# Altium footprint library Package_DFN_QFN.PcbLib: 735 footprints (part 10 of 46)
Each footprint in its own frame and in the unit in brackets; x right, y up, seen from the top. Pads: shape width x height; smd on the part's side, far side on the other; paste and mask are expansions set on the pad; w line width, h text height; cw(c..) or ccw(c..) is an arc to the next point about the centre after c.
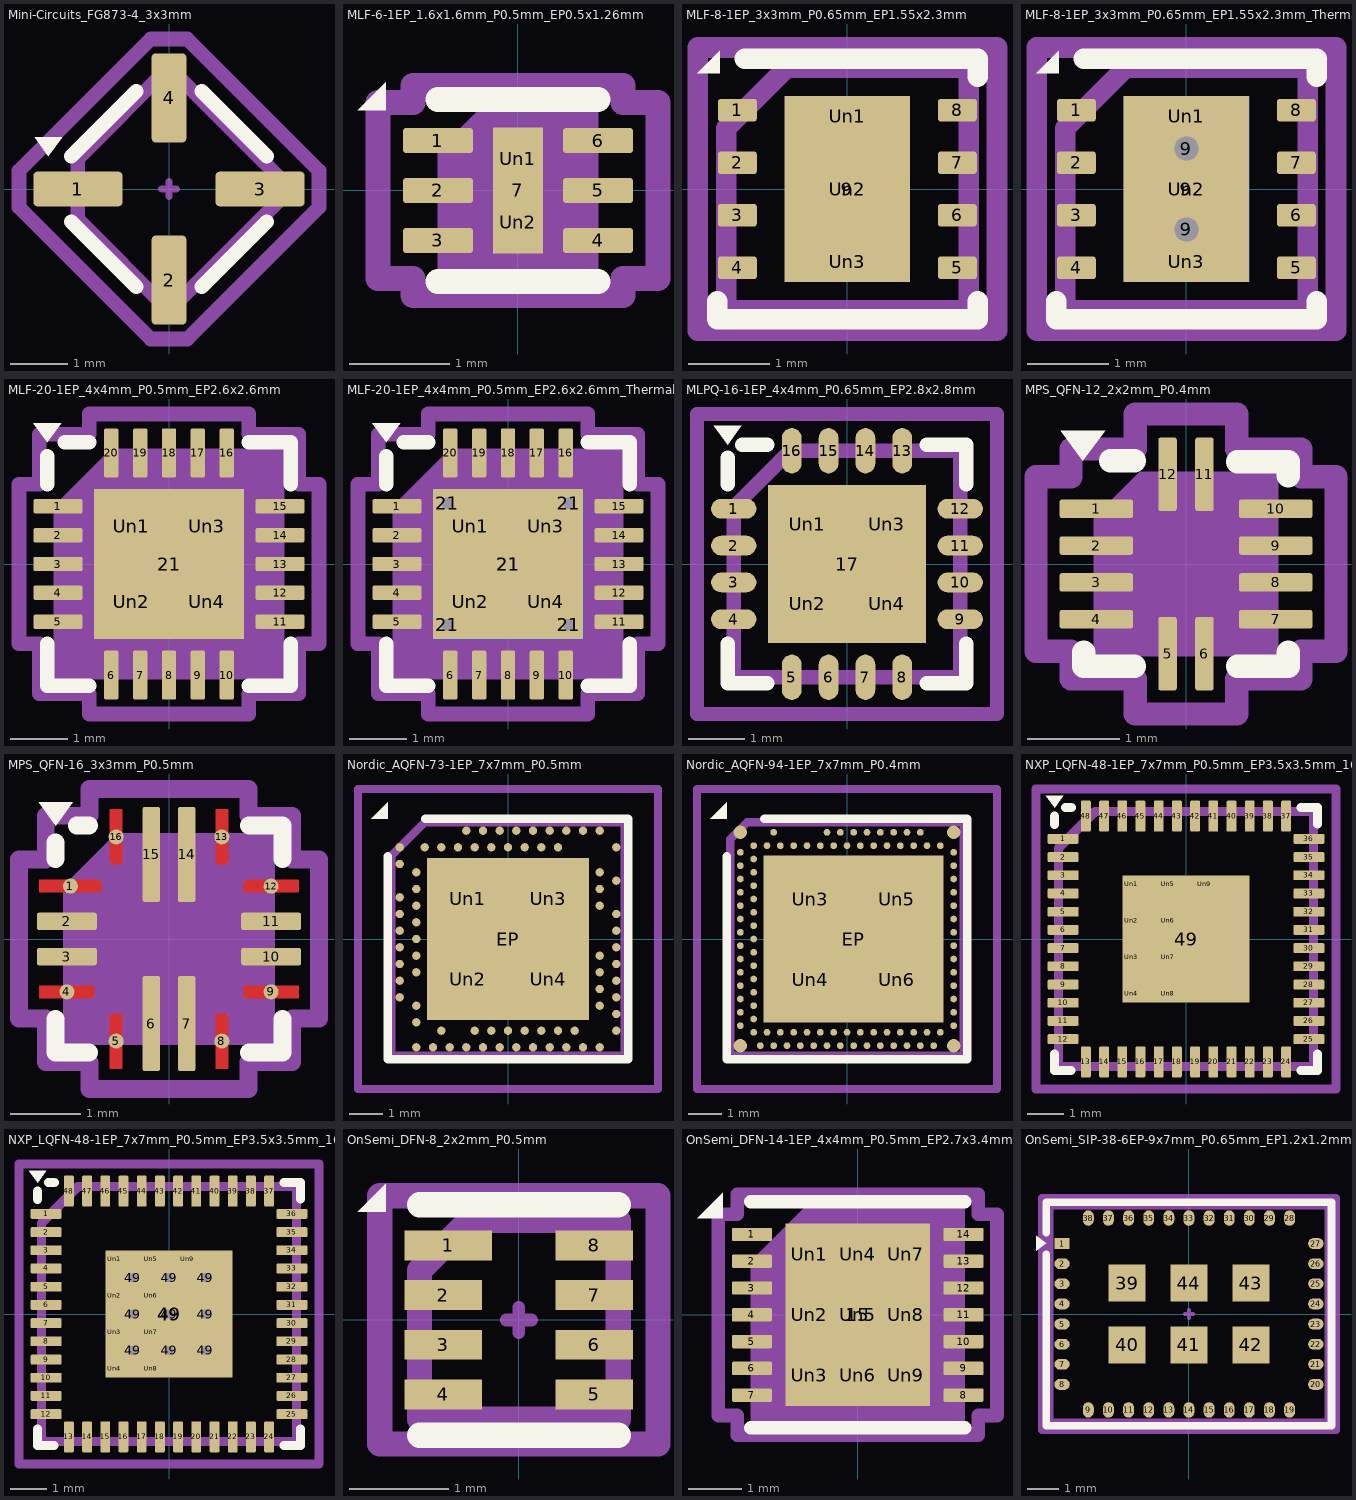
[diagram p9: the footprints below, top view; thin cyan lines are the x and y axes]

## Mini-Circuits_FG873-4_3x3mm [mm] "Mini-Circuits_FG873-4_3x3mm"
pads (4):
  rrect25% 1.55x0.61 smd: 1(-1.585,0) 3(1.585,0)
  rrect25% 0.61x1.55 smd: 2(0,-1.585) 4(0,1.585)
F.SilkS:
  region: -2.1,0.57 -2.34,0.9 -1.86,0.9
  lines w0.254: -1.7,-0.57 -0.57,-1.7 ; -1.7,0.57 -0.57,1.7 ; 0.57,-1.7 1.7,-0.57 ; 0.57,1.7 1.7,0.57
Top Component Center:
  lines w0.127: -0.127,0 0.127,0 -0.127,0 ; 0,-0.127 0,0.127 0,-0.127
Top Assembly:
  lines w0.254: -1.591,-0.53 -1.591,0.53 0,2.121 2.121,0 0,-2.121 -1.591,-0.53
Top Courtyard:
  lines w0.254: -2.61,-0.32 -2.61,0.32 -0.32,2.61 0.32,2.61 2.61,0.32 2.61,-0.32 0.32,-2.61 -0.32,-2.61 -2.61,-0.32
Top Designator:
  text ".Designator" at -3.43,-0.344 h1.52
3D body "Mini-Circuits_FG873-4_3x3mm.step": height 0.89, standoff 0, extent -2.11,-2.107 2.11,2.107

## MLF-6-1EP_1.6x1.6mm_P0.5mm_EP0.5x1.26mm [mm] "MLF-6-1EP_1.6x1.6mm_P0.5mm_EP0.5x1.26mm"
pads (9):
  rrect25% 0.7x0.25 smd: 1(-0.8,0.5) 2(-0.8,0) 3(-0.8,-0.5) 4(0.8,-0.5) 5(0.8,0) 6(0.8,0.5)
  rect 0.5x1.26 smd: 7(0,0)
  rrect25% 0.4x0.51 on Top Paste: Un1(0,0.315) Un2(0,-0.315)
F.SilkS:
  region: -1.32,0.8 -1.6,0.8 -1.32,1.08
  lines w0.254: -0.8,-0.91 0.8,-0.91 ; -0.8,0.91 0.8,0.91
Top Component Center:
  lines w0.127: -0.127,0 0.127,0 -0.127,0 ; 0,-0.127 0,0.127 0,-0.127
Top Assembly:
  region: 0.8,-0.8 -0.8,-0.8 -0.8,0.4 -0.4,0.8 0.8,0.8
Top Courtyard:
  lines w0.254: -1.4,-0.88 -1.05,-0.88 -1.05,-1.05 1.05,-1.05 1.05,-0.88 1.4,-0.88 1.4,0.88 1.05,0.88 1.05,1.05 -1.05,1.05 -1.05,0.88 -1.4,0.88 -1.4,-0.88
Top Designator:
  text ".Designator" at -2.251,-0.226 h1

## MLF-8-1EP_3x3mm_P0.65mm_EP1.55x2.3mm [mm] "MLF-8-1EP_3x3mm_P0.65mm_EP1.55x2.3mm"
pads (12):
  rrect25% 0.48x0.28 smd: 1(-1.36,0.975) 2(-1.36,0.325) 3(-1.36,-0.325) 4(-1.36,-0.975) 5(1.36,-0.975) 6(1.36,-0.325) 7(1.36,0.325) 8(1.36,0.975)
  rect 1.55x2.3 smd: 9(0,0)
  rrect25% 1.5x0.4 on Top Paste: Un1(0,0.9) Un3(0,-0.9)
  rrect25% 1.5x0.65 on Top Paste: Un2(0,0)
F.SilkS:
  region: -1.58,1.43 -1.86,1.43 -1.58,1.71
  lines w0.254: -1.61,-1.39 -1.61,-1.61 1.61,-1.61 1.61,-1.39 ; -1.27,1.61 1.61,1.61 1.61,1.39
Top Component Center:
  lines w0.127: -0.127,0 0.127,0 -0.127,0 ; 0,-0.127 0,0.127 0,-0.127
Top Assembly:
  lines w0.254: -1.5,-1.5 1.5,-1.5 1.5,1.5 -0.75,1.5 -1.5,0.75 -1.5,-1.5
Top Courtyard:
  lines w0.254: -1.85,-1.75 1.85,-1.75 1.85,1.75 -1.85,1.75 -1.85,-1.75
Top Designator:
  text ".Designator" at -2.251,-0.226 h1

## MLF-8-1EP_3x3mm_P0.65mm_EP1.55x2.3mm_ThermalVias [mm] "MLF-8-1EP_3x3mm_P0.65mm_EP1.55x2.3mm_ThermalVias"
pads (15):
  rrect25% 0.48x0.28 smd: 1(-1.36,0.975) 2(-1.36,0.325) 3(-1.36,-0.325) 4(-1.36,-0.975) 5(1.36,-0.975) 6(1.36,-0.325) 7(1.36,0.325) 8(1.36,0.975)
  round 0.6 hole 0.3: 9(0,-0.5) 9(0,0.5)
  rect 1.55x2.3 smd: 9(0,0)
  rect 1.55x2.3 smd far side: 9(0,0)
  rrect25% 1.5x0.4 on Top Paste: Un1(0,0.9) Un3(0,-0.9)
  rrect25% 1.5x0.65 on Top Paste: Un2(0,0)
F.SilkS:
  region: -1.58,1.43 -1.86,1.43 -1.58,1.71
  lines w0.254: -1.61,-1.39 -1.61,-1.61 1.61,-1.61 1.61,-1.39 ; -1.27,1.61 1.61,1.61 1.61,1.39
Top Component Center:
  lines w0.127: -0.127,0 0.127,0 -0.127,0 ; 0,-0.127 0,0.127 0,-0.127
Top Assembly:
  lines w0.254: -1.5,-1.5 -1.5,0.75 -0.75,1.5 1.5,1.5 1.5,-1.5 -1.5,-1.5
Top Courtyard:
  lines w0.254: -1.85,-1.75 -1.85,1.75 1.85,1.75 1.85,-1.75 -1.85,-1.75
Top Designator:
  text ".Designator" at -2.251,-0.226 h1

## MLF-20-1EP_4x4mm_P0.5mm_EP2.6x2.6mm [mm] "MLF-20-1EP_4x4mm_P0.5mm_EP2.6x2.6mm"
pads (25):
  rrect25% 0.85x0.25 smd: 1(-1.925,1) 2(-1.925,0.5) 3(-1.925,0) 4(-1.925,-0.5) 5(-1.925,-1) 11(1.925,-1) 12(1.925,-0.5) 13(1.925,0) 14(1.925,0.5) 15(1.925,1)
  rrect25% 0.25x0.85 smd: 6(-1,-1.925) 7(-0.5,-1.925) 8(0,-1.925) 9(0.5,-1.925) 10(1,-1.925) 16(1,1.925) 17(0.5,1.925) 18(0,1.925) 19(-0.5,1.925) 20(-1,1.925)
  rect 2.6x2.6 smd: 21(0,0)
  rrect24% 1.05x1.05 on Top Paste: Un1(-0.65,0.65) Un2(-0.65,-0.65) Un3(0.65,0.65) Un4(0.65,-0.65)
F.SilkS:
  region: -2.11,2.11 -2.35,2.44 -1.87,2.44
  lines w0.254: -2.11,-1.385 -2.11,-2.11 -1.385,-2.11 ; -2.11,1.385 -2.11,1.87 ; -1.81,2.11 -1.385,2.11 ; 1.385,-2.11 2.11,-2.11 2.11,-1.385 ; 1.385,2.11 2.11,2.11 2.11,1.385
Top Component Center:
  lines w0.127: -0.127,0 0.127,0 -0.127,0 ; 0,-0.127 0,0.127 0,-0.127
Top Assembly:
  region: 2,-2 -2,-2 -2,1 -1,2 2,2
Top Courtyard:
  lines w0.254: -2.6,-1.38 -2.6,1.38 -2.25,1.38 -2.25,2.25 -1.38,2.25 -1.38,2.6 1.38,2.6 1.38,2.25 2.25,2.25 2.25,1.38 2.6,1.38 2.6,-1.38 2.25,-1.38 2.25,-2.25 1.38,-2.25 1.38,-2.6 -1.38,-2.6 -1.38,-2.25 -2.25,-2.25 -2.25,-1.38 -2.6,-1.38
Top Designator:
  text ".Designator" at -3.43,-0.344 h1.52

## MLF-20-1EP_4x4mm_P0.5mm_EP2.6x2.6mm_ThermalVias [mm] "MLF-20-1EP_4x4mm_P0.5mm_EP2.6x2.6mm_ThermalVias"
pads (30):
  rrect25% 0.85x0.25 smd: 1(-1.925,1) 2(-1.925,0.5) 3(-1.925,0) 4(-1.925,-0.5) 5(-1.925,-1) 11(1.925,-1) 12(1.925,-0.5) 13(1.925,0) 14(1.925,0.5) 15(1.925,1)
  rrect25% 0.25x0.85 smd: 6(-1,-1.925) 7(-0.5,-1.925) 8(0,-1.925) 9(0.5,-1.925) 10(1,-1.925) 16(1,1.925) 17(0.5,1.925) 18(0,1.925) 19(-0.5,1.925) 20(-1,1.925)
  round 0.5 hole 0.2: 21(-1.05,-1.05) 21(-1.05,1.05) 21(1.05,-1.05) 21(1.05,1.05)
  rect 2.6x2.6 smd: 21(0,0)
  rect 2.6x2.6 smd far side: 21(0,0)
  rrect22% 1.13x1.13 on Top Paste: Un1(-0.65,0.65) Un2(-0.65,-0.65) Un3(0.65,0.65) Un4(0.65,-0.65)
F.SilkS:
  region: -2.11,2.11 -2.35,2.44 -1.87,2.44
  lines w0.254: -2.11,-1.385 -2.11,-2.11 -1.385,-2.11 ; -2.11,1.385 -2.11,1.87 ; -1.81,2.11 -1.385,2.11 ; 1.385,-2.11 2.11,-2.11 2.11,-1.385 ; 1.385,2.11 2.11,2.11 2.11,1.385
Top Component Center:
  lines w0.127: -0.127,0 0.127,0 -0.127,0 ; 0,-0.127 0,0.127 0,-0.127
Top Assembly:
  region: 2,-2 -2,-2 -2,1 -1,2 2,2
Top Courtyard:
  lines w0.254: -2.6,-1.38 -2.6,1.38 -2.25,1.38 -2.25,2.25 -1.38,2.25 -1.38,2.6 1.38,2.6 1.38,2.25 2.25,2.25 2.25,1.38 2.6,1.38 2.6,-1.38 2.25,-1.38 2.25,-2.25 1.38,-2.25 1.38,-2.6 -1.38,-2.6 -1.38,-2.25 -2.25,-2.25 -2.25,-1.38 -2.6,-1.38
Top Designator:
  text ".Designator" at -3.43,-0.344 h1.52

## MLPQ-16-1EP_4x4mm_P0.65mm_EP2.8x2.8mm [mm] "MLPQ-16-1EP_4x4mm_P0.65mm_EP2.8x2.8mm"
pads (21):
  rrect100% 0.8x0.35 smd: 1(-2,0.975) 2(-2,0.325) 3(-2,-0.325) 4(-2,-0.975) 9(2,-0.975) 10(2,-0.325) 11(2,0.325) 12(2,0.975)
  rrect100% 0.35x0.8 smd: 5(-0.975,-2) 6(-0.325,-2) 7(0.325,-2) 8(0.975,-2) 13(0.975,2) 14(0.325,2) 15(-0.325,2) 16(-0.975,2)
  rect 2.8x2.8 smd: 17(0,0)
  rect 1.13x1.13 on Top Paste: Un1(-0.7,0.7) Un2(-0.7,-0.7) Un3(0.7,0.7) Un4(0.7,-0.7)
F.SilkS:
  region: -2.11,2.11 -2.35,2.44 -1.87,2.44
  lines w0.254: -2.11,-1.41 -2.11,-2.11 -1.41,-2.11 ; -2.11,1.41 -2.11,1.88 ; -1.85,2.11 -1.41,2.11 ; 1.41,-2.11 2.11,-2.11 2.11,-1.41 ; 1.41,2.11 2.11,2.11 2.11,1.41
Top Component Center:
  lines w0.127: -0.127,0 0.127,0 -0.127,0 ; 0,-0.127 0,0.127 0,-0.127
Top Assembly:
  lines w0.254: -2,-2 2,-2 2,2 -1,2 -2,1 -2,-2
Top Courtyard:
  lines w0.254: -2.65,-2.65 2.65,-2.65 2.65,2.65 -2.65,2.65 -2.65,-2.65
Top Designator:
  text ".Designator" at -3.43,-0.344 h1.52

## MPS_QFN-12_2x2mm_P0.4mm [mm] "MPS_QFN-12_2x2mm_P0.4mm"
pads (12):
  rrect25% 0.8x0.2 smd: 1(-0.975,0.6) 2(-0.975,0.2) 3(-0.975,-0.2) 4(-0.975,-0.6) 7(0.975,-0.6) 8(0.975,-0.2) 9(0.975,0.2) 10(0.975,0.6)
  rrect25% 0.2x0.8 smd: 5(-0.2,-0.975) 6(0.2,-0.975) 11(0.2,0.975) 12(-0.2,0.975)
F.SilkS:
  region: -1.12,1.12 -1.36,1.45 -0.88,1.45
  lines w0.254: -1.11,-0.96 -1.11,-1.11 -0.56,-1.11 ; -0.82,1.12 -0.56,1.12 ; 0.56,-1.11 1.11,-1.11 1.11,-0.96 ; 0.56,1.11 1.11,1.11 1.11,0.96
Top Component Center:
  lines w0.127: -0.127,0 0.127,0 -0.127,0 ; 0,-0.127 0,0.127 0,-0.127
Top Assembly:
  region: 1,-1 -1,-1 -1,0.5 -0.5,1 1,1
Top Courtyard:
  lines w0.254: -1.63,-0.95 -1.25,-0.95 -1.25,-1.25 -0.55,-1.25 -0.55,-1.63 0.55,-1.63 0.55,-1.25 1.25,-1.25 1.25,-0.95 1.63,-0.95 1.63,0.95 1.25,0.95 1.25,1.25 0.55,1.25 0.55,1.63 -0.55,1.63 -0.55,1.25 -1.25,1.25 -1.25,0.95 -1.63,0.95 -1.63,-0.95
Top Designator:
  text ".Designator" at -2.251,-0.226 h1

## MPS_QFN-16_3x3mm_P0.5mm [mm] "MPS_QFN-16_3x3mm_P0.5mm"
pads (16):
  round 0.215 smd: 1(-1.4,0.75) 4(-1.45,-0.75) 5(-0.75,-1.45) 8(0.75,-1.45) 9(1.45,-0.75) 12(1.45,0.75) 13(0.75,1.45) 16(-0.75,1.45)
  rrect25% 0.85x0.25 smd: 2(-1.45,0.25) 3(-1.45,-0.25) 10(1.45,-0.25) 11(1.45,0.25)
  rrect25% 0.25x1.35 smd: 6(-0.25,-1.2) 7(0.25,-1.2) 14(0.25,1.2) 15(-0.25,1.2)
F.Cu:
  region: -0.96,0.81 -0.96,0.66 -1.84,0.66 -1.84,0.84 -0.99,0.84
  region: -1.06,-0.81 -1.09,-0.84 -1.84,-0.84 -1.84,-0.66 -1.06,-0.66
  region: -0.66,-1.84 -0.84,-1.84 -0.84,-1.09 -0.81,-1.06 -0.66,-1.06
  region: 0.84,-1.09 0.84,-1.84 0.66,-1.84 0.66,-1.06 0.81,-1.06
  region: 1.84,-0.84 1.09,-0.84 1.06,-0.81 1.06,-0.66 1.84,-0.66
  region: 1.84,0.66 1.06,0.66 1.06,0.81 1.09,0.84 1.84,0.84
  region: 0.84,1.09 0.81,1.06 0.66,1.06 0.66,1.84 0.84,1.84
  region: -0.66,1.06 -0.81,1.06 -0.84,1.09 -0.84,1.84 -0.66,1.84
F.SilkS:
  region: -1.61,1.61 -1.85,1.94 -1.37,1.94
  lines w0.254: -1.61,-1.135 -1.61,-1.61 -1.135,-1.61 ; -1.61,1.135 -1.61,1.37 ; -1.31,1.61 -1.135,1.61 ; 1.135,-1.61 1.61,-1.61 1.61,-1.135 ; 1.135,1.61 1.61,1.61 1.61,1.135
F.Paste:
  region: -0.96,0.81 -0.96,0.66 -1.84,0.66 -1.84,0.84 -0.99,0.84
  region: -1.06,-0.81 -1.09,-0.84 -1.84,-0.84 -1.84,-0.66 -1.06,-0.66
  region: -0.66,-1.84 -0.84,-1.84 -0.84,-1.09 -0.81,-1.06 -0.66,-1.06
  region: 0.84,-1.09 0.84,-1.84 0.66,-1.84 0.66,-1.06 0.81,-1.06
  region: 1.84,-0.84 1.09,-0.84 1.06,-0.81 1.06,-0.66 1.84,-0.66
  region: 1.84,0.66 1.06,0.66 1.06,0.81 1.09,0.84 1.84,0.84
  region: 0.84,1.09 0.81,1.06 0.66,1.06 0.66,1.84 0.84,1.84
  region: -0.66,1.06 -0.81,1.06 -0.84,1.09 -0.84,1.84 -0.66,1.84
F.Mask:
  region: -0.96,0.81 -0.96,0.66 -1.84,0.66 -1.84,0.84 -0.99,0.84
  region: -1.06,-0.81 -1.09,-0.84 -1.84,-0.84 -1.84,-0.66 -1.06,-0.66
  region: -0.66,-1.84 -0.84,-1.84 -0.84,-1.09 -0.81,-1.06 -0.66,-1.06
  region: 0.84,-1.09 0.84,-1.84 0.66,-1.84 0.66,-1.06 0.81,-1.06
  region: 1.84,-0.84 1.09,-0.84 1.06,-0.81 1.06,-0.66 1.84,-0.66
  region: 1.84,0.66 1.06,0.66 1.06,0.81 1.09,0.84 1.84,0.84
  region: 0.84,1.09 0.81,1.06 0.66,1.06 0.66,1.84 0.84,1.84
  region: -0.66,1.06 -0.81,1.06 -0.84,1.09 -0.84,1.84 -0.66,1.84
Top Component Center:
  lines w0.127: -0.127,0 0.127,0 -0.127,0 ; 0,-0.127 0,0.127 0,-0.127
Top Assembly:
  region: 1.5,-1.5 -1.5,-1.5 -1.5,0.75 -0.75,1.5 1.5,1.5
Top Courtyard:
  lines w0.254: -2.13,-1.13 -2.13,1.13 -1.75,1.13 -1.75,1.75 -1.13,1.75 -1.13,2.13 1.13,2.13 1.13,1.75 1.75,1.75 1.75,1.13 2.13,1.13 2.13,-1.13 1.75,-1.13 1.75,-1.75 1.13,-1.75 1.13,-2.13 -1.13,-2.13 -1.13,-1.75 -1.75,-1.75 -1.75,-1.13 -2.13,-1.13
Top Designator:
  text ".Designator" at -3.43,-0.344 h1.52

## Nordic_AQFN-73-1EP_7x7mm_P0.5mm [mm] "Nordic_AQFN-73-1EP_7x7mm_P0.5mm"
pads (78):
  round 0.25 smd: A8(-1.25,3.25) A10(-0.75,3.25) A12(-0.25,3.25) A14(0.25,3.25) A16(0.75,3.25) A18(1.25,3.25) A20(1.75,3.25) A22(2.25,3.25) A23(2.75,3.25) AA24(3.25,-2.25) AB2(-2.75,-2.5) AC5(-2,-2.75) AC9(-1,-2.75) AC11(-0.5,-2.75) AC13(0,-2.75) AC15(0.5,-2.75) AC17(1,-2.75) AC19(1.5,-2.75) AC21(2,-2.75) AC24(3.25,-2.75) AD2(-2.75,-3.25) AD4(-2.25,-3.25) AD6(-1.75,-3.25) AD8(-1.25,-3.25) AD10(-0.75,-3.25) AD12(-0.25,-3.25) AD14(0.25,-3.25) AD16(0.75,-3.25) AD18(1.25,-3.25) AD20(1.75,-3.25) AD22(2.25,-3.25) AD23(2.75,-3.25) B1(-3.25,2.75) B3(-2.5,2.75) B5(-2,2.75) B7(-1.5,2.75) B9(-1,2.75) B11(-0.5,2.75) B13(0,2.75) B15(0.5,2.75) B17(1,2.75) B19(1.5,2.75) B24(3.25,2.75) C1(-3.25,2.25) D2(-2.75,2) D23(2.75,2) E24(3.25,1.75) F2(-2.75,1.5) F23(2.75,1.5) G1(-3.25,1.25) H2(-2.75,1) H23(2.75,1) J1(-3.25,0.75) J24(3.25,0.75) K2(-2.75,0.5) L1(-3.25,0.25) L24(3.25,0.25) M2(-2.75,0) N1(-3.25,-0.25) N24(3.25,-0.25) P2(-2.75,-0.5) P23(2.75,-0.5) R1(-3.25,-0.75) R24(3.25,-0.75) T2(-2.75,-1) T23(2.75,-1) U1(-3.25,-1.25) U24(3.25,-1.25) V23(2.75,-1.5) W1(-3.25,-1.75) W24(3.25,-1.75) Y2(-2.75,-2) Y23(2.75,-2)
  rect 4.85x4.85 smd: EP(0,0)
  rect 2x2 on Top Paste: Un1(-1.212,1.212) Un2(-1.212,-1.212) Un3(1.212,1.212) Un4(1.212,-1.212)
F.SilkS:
  region: -3.61,3.61 -4.11,3.61 -3.61,4.11
  lines w0.254: -3.61,2.48 -3.61,-3.61 3.61,-3.61 3.61,3.61 -2.48,3.61
Top Component Center:
  lines w0.127: -0.127,0 0.127,0 -0.127,0 ; 0,-0.127 0,0.127 0,-0.127
Top Assembly:
  lines w0.254: -3.5,-3.5 -3.5,2.5 -2.5,3.5 3.5,3.5 3.5,-3.5 -3.5,-3.5
Top Courtyard:
  lines w0.254: -4.5,-4.5 4.5,-4.5 4.5,4.5 -4.5,4.5 -4.5,-4.5
Top Designator:
  text ".Designator" at -3.43,-0.344 h1.52
3D body "Nordic_AQFN-73-1EP_7x7mm_P0.5mm.step": height 0.85, standoff 0, extent -3.5,-3.5 3.5,3.5

## Nordic_AQFN-94-1EP_7x7mm_P0.4mm [mm] "Nordic_AQFN-94-1EP_7x7mm_P0.4mm"
pads (103):
  round 0.2 smd: A5(-2.2,3.2) A13(-0.6,3.2) A15(-0.2,3.2) A17(0.2,3.2) A19(0.6,3.2) A21(1,3.2) A23(1.4,3.2) A25(1.8,3.2) A27(2.2,3.2) AA1(-3.2,-1) AA31(3.2,-1) AB2(-2.8,-1.2) AC1(-3.2,-1.4) AC31(3.2,-1.4) AD2(-2.8,-1.6) AE1(-3.2,-1.8) AE31(3.2,-1.8) AF2(-2.8,-2) AG1(-3.2,-2.2) AG31(3.2,-2.2) AH2(-2.8,-2.4) AJ1(-3.2,-2.6) AJ31(3.2,-2.6) AK2(-2.8,-2.8) AK4(-2.4,-2.8) AK6(-2,-2.8) AK8(-1.6,-2.8) AK10(-1.2,-2.8) AK12(-0.8,-2.8) AK14(-0.4,-2.8) AK16(0,-2.8) AK18(0.4,-2.8) AK20(0.8,-2.8) AK22(1.2,-2.8) AK24(1.6,-2.8) AK26(2,-2.8) AK28(2.4,-2.8) AK30(2.8,-2.8) AL3(-2.6,-3.2) AL5(-2.2,-3.2) AL7(-1.8,-3.2) AL9(-1.4,-3.2) AL11(-1,-3.2) AL13(-0.6,-3.2) AL15(-0.2,-3.2) AL17(0.2,-3.2) AL19(0.6,-3.2) AL21(1,-3.2) AL23(1.4,-3.2) AL25(1.8,-3.2) AL27(2.2,-3.2) AL29(2.6,-3.2) B2(-2.8,2.8) B4(-2.4,2.8) B6(-2,2.8) B8(-1.6,2.8) B10(-1.2,2.8) B12(-0.8,2.8) B14(-0.4,2.8) B16(0,2.8) B18(0.4,2.8) B20(0.8,2.8) B22(1.2,2.8) B24(1.6,2.8) B26(2,2.8) B28(2.4,2.8) B30(2.8,2.8) C1(-3.2,2.6) C31(3.2,2.6) D2(-2.8,2.4) E1(-3.2,2.2) E31(3.2,2.2) F2(-2.8,2) G1(-3.2,1.8) G31(3.2,1.8) H2(-2.8,1.6) J1(-3.2,1.4) J31(3.2,1.4) K2(-2.8,1.2) L1(-3.2,1) L31(3.2,1) M2(-2.8,0.8) N1(-3.2,0.6) N31(3.2,0.6) P2(-2.8,0.4) R1(-3.2,0.2) R31(3.2,0.2) T2(-2.8,0) U1(-3.2,-0.2) U31(3.2,-0.2) V2(-2.8,-0.4) W1(-3.2,-0.6) W31(3.2,-0.6) Y2(-2.8,-0.8)
  rect 5.4x5 smd: EP(0.2,0)
  round 0.4 smd: Un1(-3.2,3.2) Un2(-3.2,-3.2) Un7(3.2,3.2) Un8(3.2,-3.2)
  rect 2.2x2 on Top Paste: Un3(-1.1,1.2) Un4(-1.1,-1.225) Un5(1.5,1.2) Un6(1.5,-1.225)
F.SilkS:
  region: -3.61,3.61 -4.11,3.61 -3.61,4.11
  lines w0.254: -3.61,2.48 -3.61,-3.61 3.61,-3.61 3.61,3.61 -2.48,3.61
Top Component Center:
  lines w0.127: -0.127,0 0.127,0 -0.127,0 ; 0,-0.127 0,0.127 0,-0.127
Top Assembly:
  lines w0.254: -3.5,-3.5 -3.5,3 -3,3.5 3.5,3.5 3.5,-3.5 -3.5,-3.5
Top Courtyard:
  lines w0.254: -4.5,-4.5 -4.5,4.5 4.5,4.5 4.5,-4.5 -4.5,-4.5
Top Designator:
  text ".Designator" at -3.43,-0.344 h1.52

## NXP_LQFN-48-1EP_7x7mm_P0.5mm_EP3.5x3.5mm_16xMask0.45x0.45 [mm] "NXP_LQFN-48-1EP_7x7mm_P0.5mm_EP3.5x3.5mm_16xMask0.45x0.45"
pads (65):
  rrect25% 0.85x0.27 smd: 1(-3.375,2.75) 2(-3.375,2.25) 3(-3.375,1.75) 4(-3.375,1.25) 5(-3.375,0.75) 6(-3.375,0.25) 7(-3.375,-0.25) 8(-3.375,-0.75) 9(-3.375,-1.25) 10(-3.375,-1.75) 11(-3.375,-2.25) 12(-3.375,-2.75) 25(3.375,-2.75) 26(3.375,-2.25) 27(3.375,-1.75) 28(3.375,-1.25) 29(3.375,-0.75) 30(3.375,-0.25) 31(3.375,0.25) 32(3.375,0.75) 33(3.375,1.25) 34(3.375,1.75) 35(3.375,2.25) 36(3.375,2.75)
  rrect25% 0.27x0.85 smd: 13(-2.75,-3.375) 14(-2.25,-3.375) 15(-1.75,-3.375) 16(-1.25,-3.375) 17(-0.75,-3.375) 18(-0.25,-3.375) 19(0.25,-3.375) 20(0.75,-3.375) 21(1.25,-3.375) 22(1.75,-3.375) 23(2.25,-3.375) 24(2.75,-3.375) 37(2.75,3.375) 38(2.25,3.375) 39(1.75,3.375) 40(1.25,3.375) 41(0.75,3.375) 42(0.25,3.375) 43(-0.25,3.375) 44(-0.75,3.375) 45(-1.25,3.375) 46(-1.75,3.375) 47(-2.25,3.375) 48(-2.75,3.375)
  rect 3.5x3.5 smd: 49(0,0)
  rect 0.45x0.45 on Top Solder: Un1(-1.5,1.5) Un2(-1.5,0.5) Un3(-1.5,-0.5) Un4(-1.5,-1.5) Un5(-0.5,1.5) Un6(-0.5,0.5) Un7(-0.5,-0.5) Un8(-0.5,-1.5) Un9(0.5,1.5) Un10(0.5,0.5) Un11(0.5,-0.5) Un12(0.5,-1.5) Un13(1.5,1.5) Un14(1.5,0.5) Un15(1.5,-0.5) Un16(1.5,-1.5)
F.SilkS:
  region: -3.61,3.61 -3.85,3.94 -3.37,3.94
  lines w0.254: -3.61,-3.16 -3.61,-3.61 -3.16,-3.61 ; -3.61,3.15 -3.61,3.37 ; -3.31,3.61 -3.15,3.61 ; 3.16,-3.61 3.61,-3.61 3.61,-3.16 ; 3.16,3.61 3.61,3.61 3.61,3.16
Top Component Center:
  lines w0.127: -0.127,0 0.127,0 -0.127,0 ; 0,-0.127 0,0.127 0,-0.127
Top Assembly:
  lines w0.254: -3.5,-3.5 -3.5,2.5 -2.5,3.5 3.5,3.5 3.5,-3.5 -3.5,-3.5
Top Courtyard:
  lines w0.254: -4.12,-4.12 -4.12,4.12 4.12,4.12 4.12,-4.12 -4.12,-4.12
Top Designator:
  text ".Designator" at -3.43,-0.344 h1.52

## NXP_LQFN-48-1EP_7x7mm_P0.5mm_EP3.5x3.5mm_16xMask0.45x0.45_ThermalVias [mm] "NXP_LQFN-48-1EP_7x7mm_P0.5mm_EP3.5x3.5mm_16xMask0.45x0.45_ThermalVias"
pads (75):
  rrect25% 0.85x0.27 smd: 1(-3.375,2.75) 2(-3.375,2.25) 3(-3.375,1.75) 4(-3.375,1.25) 5(-3.375,0.75) 6(-3.375,0.25) 7(-3.375,-0.25) 8(-3.375,-0.75) 9(-3.375,-1.25) 10(-3.375,-1.75) 11(-3.375,-2.25) 12(-3.375,-2.75) 25(3.375,-2.75) 26(3.375,-2.25) 27(3.375,-1.75) 28(3.375,-1.25) 29(3.375,-0.75) 30(3.375,-0.25) 31(3.375,0.25) 32(3.375,0.75) 33(3.375,1.25) 34(3.375,1.75) 35(3.375,2.25) 36(3.375,2.75)
  rrect25% 0.27x0.85 smd: 13(-2.75,-3.375) 14(-2.25,-3.375) 15(-1.75,-3.375) 16(-1.25,-3.375) 17(-0.75,-3.375) 18(-0.25,-3.375) 19(0.25,-3.375) 20(0.75,-3.375) 21(1.25,-3.375) 22(1.75,-3.375) 23(2.25,-3.375) 24(2.75,-3.375) 37(2.75,3.375) 38(2.25,3.375) 39(1.75,3.375) 40(1.25,3.375) 41(0.75,3.375) 42(0.25,3.375) 43(-0.25,3.375) 44(-0.75,3.375) 45(-1.25,3.375) 46(-1.75,3.375) 47(-2.25,3.375) 48(-2.75,3.375)
  round 0.55 hole 0.25: 49(-1,-1) 49(-1,0) 49(-1,1) 49(0,-1) 49(0,0) 49(0,1) 49(1,-1) 49(1,0) 49(1,1)
  rect 3.5x3.5 smd: 49(0,0)
  rrect12% 2.55x2.55 smd far side: 49(0,0)
  rect 0.45x0.45 on Top Solder: Un1(-1.5,1.5) Un2(-1.5,0.5) Un3(-1.5,-0.5) Un4(-1.5,-1.5) Un5(-0.5,1.5) Un6(-0.5,0.5) Un7(-0.5,-0.5) Un8(-0.5,-1.5) Un9(0.5,1.5) Un10(0.5,0.5) Un11(0.5,-0.5) Un12(0.5,-1.5) Un13(1.5,1.5) Un14(1.5,0.5) Un15(1.5,-0.5) Un16(1.5,-1.5)
F.SilkS:
  region: -3.61,3.61 -3.85,3.94 -3.37,3.94
  lines w0.254: -3.61,-3.16 -3.61,-3.61 -3.16,-3.61 ; -3.61,3.15 -3.61,3.37 ; -3.31,3.61 -3.15,3.61 ; 3.16,-3.61 3.61,-3.61 3.61,-3.16 ; 3.16,3.61 3.61,3.61 3.61,3.16
Top Component Center:
  lines w0.127: -0.127,0 0.127,0 -0.127,0 ; 0,-0.127 0,0.127 0,-0.127
Top Assembly:
  lines w0.254: -3.5,-3.5 3.5,-3.5 3.5,3.5 -2.5,3.5 -3.5,2.5 -3.5,-3.5
Top Courtyard:
  lines w0.254: -4.12,-4.12 4.12,-4.12 4.12,4.12 -4.12,4.12 -4.12,-4.12
Top Designator:
  text ".Designator" at -3.43,-0.344 h1.52

## OnSemi_DFN-8_2x2mm_P0.5mm [mm] "OnSemi_DFN-8_2x2mm_P0.5mm"
pads (8):
  rect 0.88x0.3 smd: 1(-0.71,0.75)
  rect 0.78x0.3 smd: 2(-0.76,0.25) 3(-0.76,-0.25) 4(-0.76,-0.75) 5(0.76,-0.75) 6(0.76,-0.25) 7(0.76,0.25) 8(0.76,0.75)
F.SilkS:
  region: -1.34,1.09 -1.62,1.09 -1.34,1.37
  lines w0.254: -1,-1.16 1,-1.16 ; -1,1.16 1,1.16
Top Component Center:
  lines w0.127: -0.127,0 0.127,0 -0.127,0 ; 0,-0.127 0,0.127 0,-0.127
Top Assembly:
  lines w0.254: -1,-1 1,-1 1,1 -0.5,1 -1,0.5 -1,-1
Top Courtyard:
  lines w0.254: -1.4,-1.25 1.4,-1.25 1.4,1.25 -1.4,1.25 -1.4,-1.25
Top Designator:
  text ".Designator" at -2.251,-0.226 h1

## OnSemi_DFN-14-1EP_4x4mm_P0.5mm_EP2.7x3.4mm [mm] "OnSemi_DFN-14-1EP_4x4mm_P0.5mm_EP2.7x3.4mm"
pads (24):
  rrect25% 0.75x0.25 smd: 1(-1.975,1.5) 2(-1.975,1) 3(-1.975,0.5) 4(-1.975,0) 5(-1.975,-0.5) 6(-1.975,-1) 7(-1.975,-1.5) 8(1.975,-1.5) 9(1.975,-1) 10(1.975,-0.5) 11(1.975,0) 12(1.975,0.5) 13(1.975,1) 14(1.975,1.5)
  rect 2.7x3.4 smd: 15(0,0)
  rrect25% 0.73x0.91 on Top Paste: Un1(-0.9,1.13) Un2(-0.9,0) Un3(-0.9,-1.13) Un4(0,1.13) Un5(0,0) Un6(0,-1.13) Un7(0.9,1.13) Un8(0.9,0) Un9(0.9,-1.13)
F.SilkS:
  region: -2.52,1.8 -3,1.8 -2.52,2.28
  lines w0.254: -2,-2.11 2,-2.11 ; -2,2.11 2,2.11
Top Component Center:
  lines w0.127: -0.127,0 0.127,0 -0.127,0 ; 0,-0.127 0,0.127 0,-0.127
Top Assembly:
  region: 2,-2 -2,-2 -2,1 -1,2 2,2
Top Courtyard:
  lines w0.254: -2.6,-1.88 -2.25,-1.88 -2.25,-2.25 2.25,-2.25 2.25,-1.88 2.6,-1.88 2.6,1.88 2.25,1.88 2.25,2.25 -2.25,2.25 -2.25,1.88 -2.6,1.88 -2.6,-1.88
Top Designator:
  text ".Designator" at -3.43,-0.344 h1.52
3D body "OnSemi_DFN-14-1EP_4x4mm_P0.5mm_EP2.7x3.4mm.step": height 0.9, standoff 0, extent -2,-1.987 2,1.987

## OnSemi_SIP-38-6EP-9x7mm_P0.65mm_EP1.2x1.2mm [mm] "OnSemi_SIP-38-6EP-9x7mm_P0.65mm_EP1.2x1.2mm"
pads (44):
  rect 0.5x0.35 smd: 1(-4.1,2.275)
  rrect100% 0.501x0.351 smd: 2(-4.1,1.625) 3(-4.1,0.975) 4(-4.1,0.325) 5(-4.1,-0.325) 6(-4.1,-0.975) 7(-4.1,-1.625) 8(-4.1,-2.275) 20(4.1,-2.275) 21(4.1,-1.625) 22(4.1,-0.975) 23(4.1,-0.325) 24(4.1,0.325) 25(4.1,0.975) 26(4.1,1.625) 27(4.1,2.275)
  rrect100% 0.351x0.501 smd: 9(-3.25,-3.1) 10(-2.6,-3.1) 11(-1.95,-3.1) 12(-1.3,-3.1) 13(-0.65,-3.1) 14(0,-3.1) 15(0.65,-3.1) 16(1.3,-3.1) 17(1.95,-3.1) 18(2.6,-3.1) 19(3.25,-3.1) 28(3.25,3.1) 29(2.6,3.1) 30(1.95,3.1) 31(1.3,3.1) 32(0.65,3.1) 33(0,3.1) 34(-0.65,3.1) 35(-1.3,3.1) 36(-1.95,3.1) 37(-2.6,3.1) 38(-3.25,3.1)
  rect 1.2x1.2 smd: 39(-2,1) 40(-2,-1) 41(0,-1) 42(2,-1) 43(2,1) 44(0,1)
F.SilkS:
  region: -4.61,2.28 -4.94,2.04 -4.94,2.52
  lines w0.254: -4.61,1.93 -4.61,-3.61 4.6,-3.61 ; -4.61,2.63 -4.61,3.6 ; -4.61,3.61 4.61,3.61 4.61,-3.61
Top Component Center:
  lines w0.127: -0.127,0 0.127,0 -0.127,0 ; 0,-0.127 0,0.127 0,-0.127
Top Assembly:
  lines w0.254: -4.5,-3.5 -4.5,3.5 4.5,3.5 4.5,-3.5 -4.5,-3.5
Top Courtyard:
  lines w0.254: -4.75,-3.75 -4.75,3.75 4.75,3.75 4.75,-3.75 -4.75,-3.75
Top Designator:
  text ".Designator" at -3.43,-0.344 h1.52
3D body "OnSemi_SIP-38-6EP-9x7mm_P0.65mm_EP1.2x1.2mm.step": height 1.05, standoff 0, extent -4.5,-3.5 4.5,3.5